# Altium footprint library MOLEX_5034801200.PcbLib: 1 footprints
Each footprint in its own frame and in the unit in brackets; x right, y up, seen from the top. Pads: shape width x height; smd on the part's side, far side on the other; paste and mask are expansions set on the pad; w line width, h text height; cw(c..) or ccw(c..) is an arc to the next point about the centre after c.
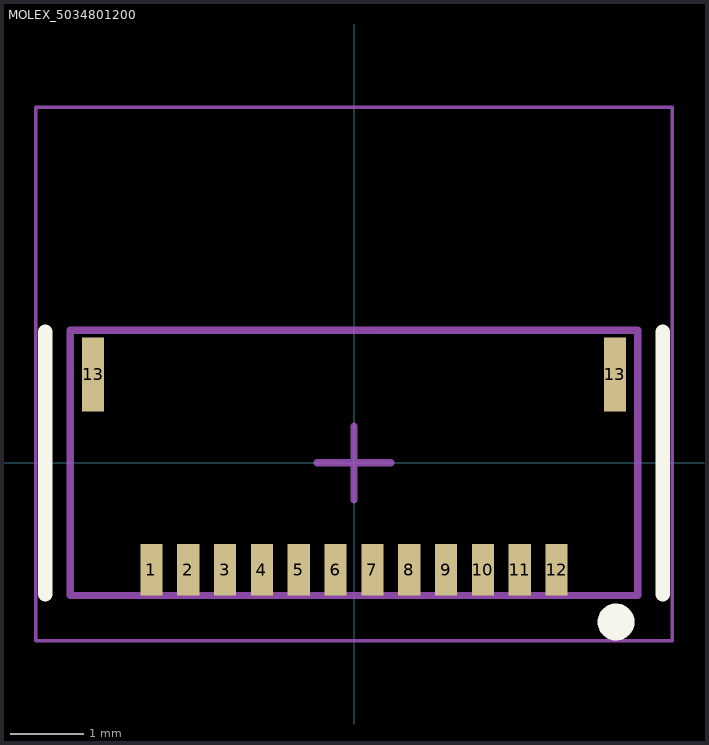
[diagram p0: the footprint, top view; thin cyan lines are the x and y axes]

## MOLEX_5034801200 [mm]
height 1
pads (14):
  rect 0.3x0.7 smd: 1(-2.75,-1.45) 2(-2.25,-1.45) 3(-1.75,-1.45) 4(-1.25,-1.45) 5(-0.75,-1.45) 6(-0.25,-1.45) 7(0.25,-1.45) 8(0.75,-1.45) 9(1.25,-1.45) 10(1.75,-1.45) 11(2.25,-1.45) 12(2.75,-1.45)
  rect 0.3x1 smd: 13(-3.54,1.2) 13(3.54,1.2)
Top Overlay:
  circle w0.25: c3.556,-2.159 r0.125
  lines w0.2: -4.191,-1.778 -4.191,1.778 ; 4.191,-1.778 4.191,1.778
Mechanical 13:
  lines w0.1: -3.85,-1.8 -3.85,1.8 3.85,1.8 3.85,-1.8 -3.85,-1.8
Mechanical 15:
  lines w0.05: -4.318,-2.413 4.318,-2.413 4.318,4.826 -4.318,4.826 -4.318,-2.413
  lines w0.1: -0.5,0 0.5,0 ; 0,-0.5 0,0.5
3D body "5034801200_0.stp": height 1.03, standoff 0.01, extent -3.85,-2.095 3.85,1.905